# Altium footprint library Relay Board.PcbLib: 5 footprints
Each footprint in its own frame and in the unit in brackets; x right, y up, seen from the top. Pads: shape width x height; smd on the part's side, far side on the other; paste and mask are expansions set on the pad; w line width, h text height; cw(c..) or ccw(c..) is an arc to the next point about the centre after c.
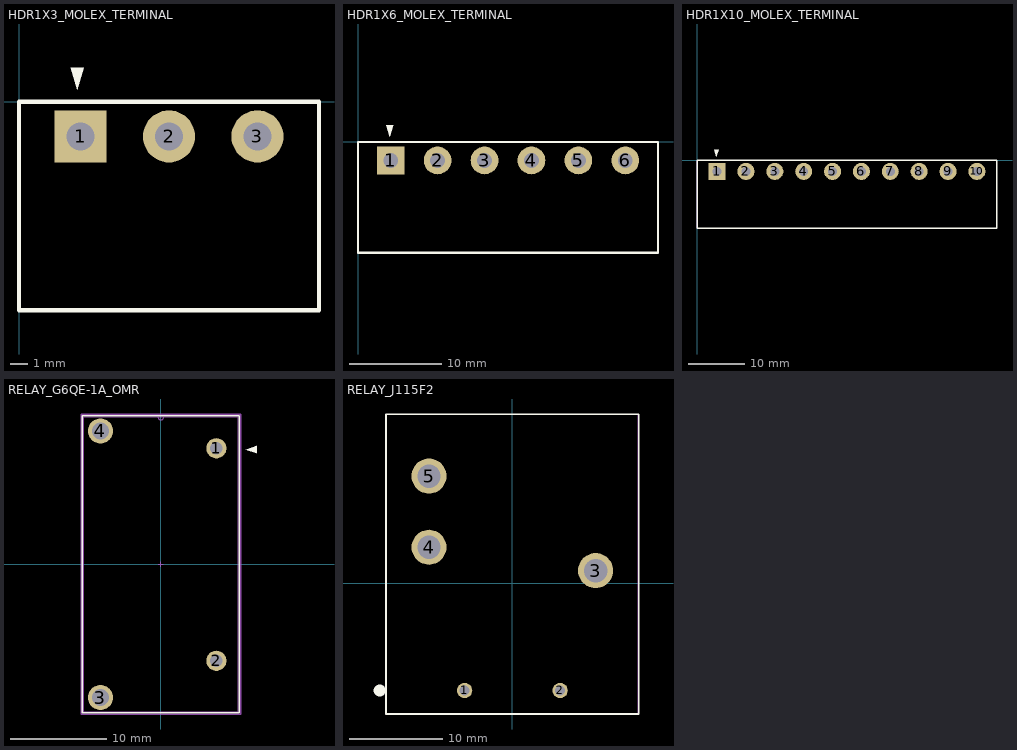
[diagram p0: the footprints below, top view; thin cyan lines are the x and y axes]

## HDR1X3_MOLEX_TERMINAL [mm]
pads (3):
  rect 3x3 hole 1.6: 1(3.54,-2)
  round 3 hole 1.6: 2(8.62,-2) 3(13.7,-2)
Top Overlay:
  region: 3.35,0.69 3.731,1.96 2.969,1.96
  lines w0.254: 0,-12 17.24,-12 17.24,0 0,0 0,-12
Top Assembly:
  lines w0.127: 0,-12 17.24,-12 17.24,0 0,0 0,-12
  text "3" at 13.7,-1.988 h1.02
  text "1" at 3.34,-2 h1.02
  text ".Designator" at 9.23,-4.084 h1.52
3D body "395321003.stp": height 8.38, standoff -3.81, extent -0.007,-12 17.24,-0.062

## HDR1X6_MOLEX_TERMINAL [mm]
pads (6):
  rect 3x3 hole 1.6: 1(3.54,-2)
  round 3 hole 1.6: 2(8.62,-2) 3(13.7,-2) 4(18.78,-2) 5(23.86,-2) 6(28.94,-2)
Top Overlay:
  region: 3.413,0.54 3.794,1.81 3.032,1.81
  lines w0.254: 0,-12 0,0 32.48,0 32.48,-12 0,-12
Top Assembly:
  lines w0.127: 0,-12 0,0 32.48,0 32.48,-12 0,-12
  text ".Designator" at 16.896,-4.084 h1.52
  text "1" at 3.286,-2.381 h1.02
  text "6" at 28.686,-2.369 h1.02
3D body "395321006.stp": height 8.38, standoff -3.81, extent -0.007,-12 32.48,-0.062

## HDR1X10_MOLEX_TERMINAL [mm]
pads (10):
  rect 3x3 hole 1.6: 1(3.54,-2)
  round 3 hole 1.6: 2(8.62,-2) 3(13.7,-2) 4(18.78,-2) 5(23.86,-2) 6(28.94,-2) 7(34.02,-2) 8(39.1,-2) 9(44.18,-2) 10(49.26,-2)
Top Overlay:
  region: 3.413,0.54 3.794,1.81 3.032,1.81
  lines w0.254: 0,-12 0,0 52.8,0 52.8,-12 0,-12
Top Assembly:
  lines w0.127: 0,-12 0,0 52.8,0 52.8,-12 0,-12
  text "1" at 3.286,-2.381 h1.02
  text ".Designator" at 25.05,-3.629 h1.52
  text "10" at 48.827,-2.329 h1.02
3D body "395321010.stp": height 8.38, standoff -3.81, extent -0.003,-12 52.803,-0.062

## RELAY_G6QE-1A_OMR [mm]
pads (4):
  round 2.1 / inner round 1.808 / far side round 1.808 hole 1.3 mask+0: 1(5.75,12) 2(5.75,-10)
  round 2.6 / inner round 2.308 / far side round 2.308 hole 1.8 mask+0: 3(-6.25,-13.8) 4(-6.25,13.8)
Top Overlay:
  region: 8.798,11.873 9.941,12.254 9.941,11.492
  lines w0.152: -8.127,-15.377 8.127,-15.377 8.127,15.377 -8.127,15.377 -8.127,-15.377
Top Assembly:
  circle w0.127: c5.75,12 r0.284
  lines w0.127: -0.305,15.25 ccw(c0,15.25) 0.305,15.25 ; -0.25,0 0.25,0 ; 0,-0.25 0,0.25 ; -8,-15.25 8,-15.25 8,15.25 -8,15.25 -8,-15.25
  text ".Designator" at -1.524,-1.524 h1.52
Top Courtyard:
  lines w0.152: -8.254,-15.504 -8.254,15.504 8.254,15.504 8.254,-15.504 -8.254,-15.504
3D body "G6QE_1A.step": height 20.5, standoff -3.5, extent -8,-15.25 8,15.25
3D body: height 0.25, standoff 0, extent 5.75,12 6.004,12.254

## RELAY_J115F2 [mm]
pads (5):
  round 1.65 hole 1.1: 1(-5.1,-11.45) 2(5.1,-11.45)
  round 3.75 hole 2.5: 3(8.9,1.35) 4(-8.9,3.85) 5(-8.9,11.45)
Top Overlay:
  circle w0.762: c-14.17,-11.45 r0.254
  lines w0.2: -13.5,-13.962 -13.5,18.038 ; -13.5,-13.95 13.5,-13.95 ; -13.5,18.05 13.5,18.05 ; 13.5,-13.962 13.5,18.038
Top Assembly:
  lines w0.1: -13.5,-13.95 13.5,-13.95 ; -13.5,-13.918 -13.5,18.082 ; -13.5,18.07 13.5,18.07 ; 13.5,-13.918 13.5,18.082
  text ".Designator" at -0.508,-0.508 h1.52
Mechanical 20:
  lines w0.1: -13.462,-13.95 -13.462,18.054 13.462,18.054 13.462,-13.95 -13.462,-13.95
3D body "J115F21CH24VDCS61.5U.stp": height 27.95, standoff -5, extent -13.5,-13.95 13.5,18.05